# Altium footprint library FootPrintLib_12.PcbLib: 319 footprints (part 9 of 20)
Each footprint in its own frame and in the unit in brackets; x right, y up, seen from the top. Pads: shape width x height; smd on the part's side, far side on the other; paste and mask are expansions set on the pad; w line width, h text height; cw(c..) or ccw(c..) is an arc to the next point about the centre after c.
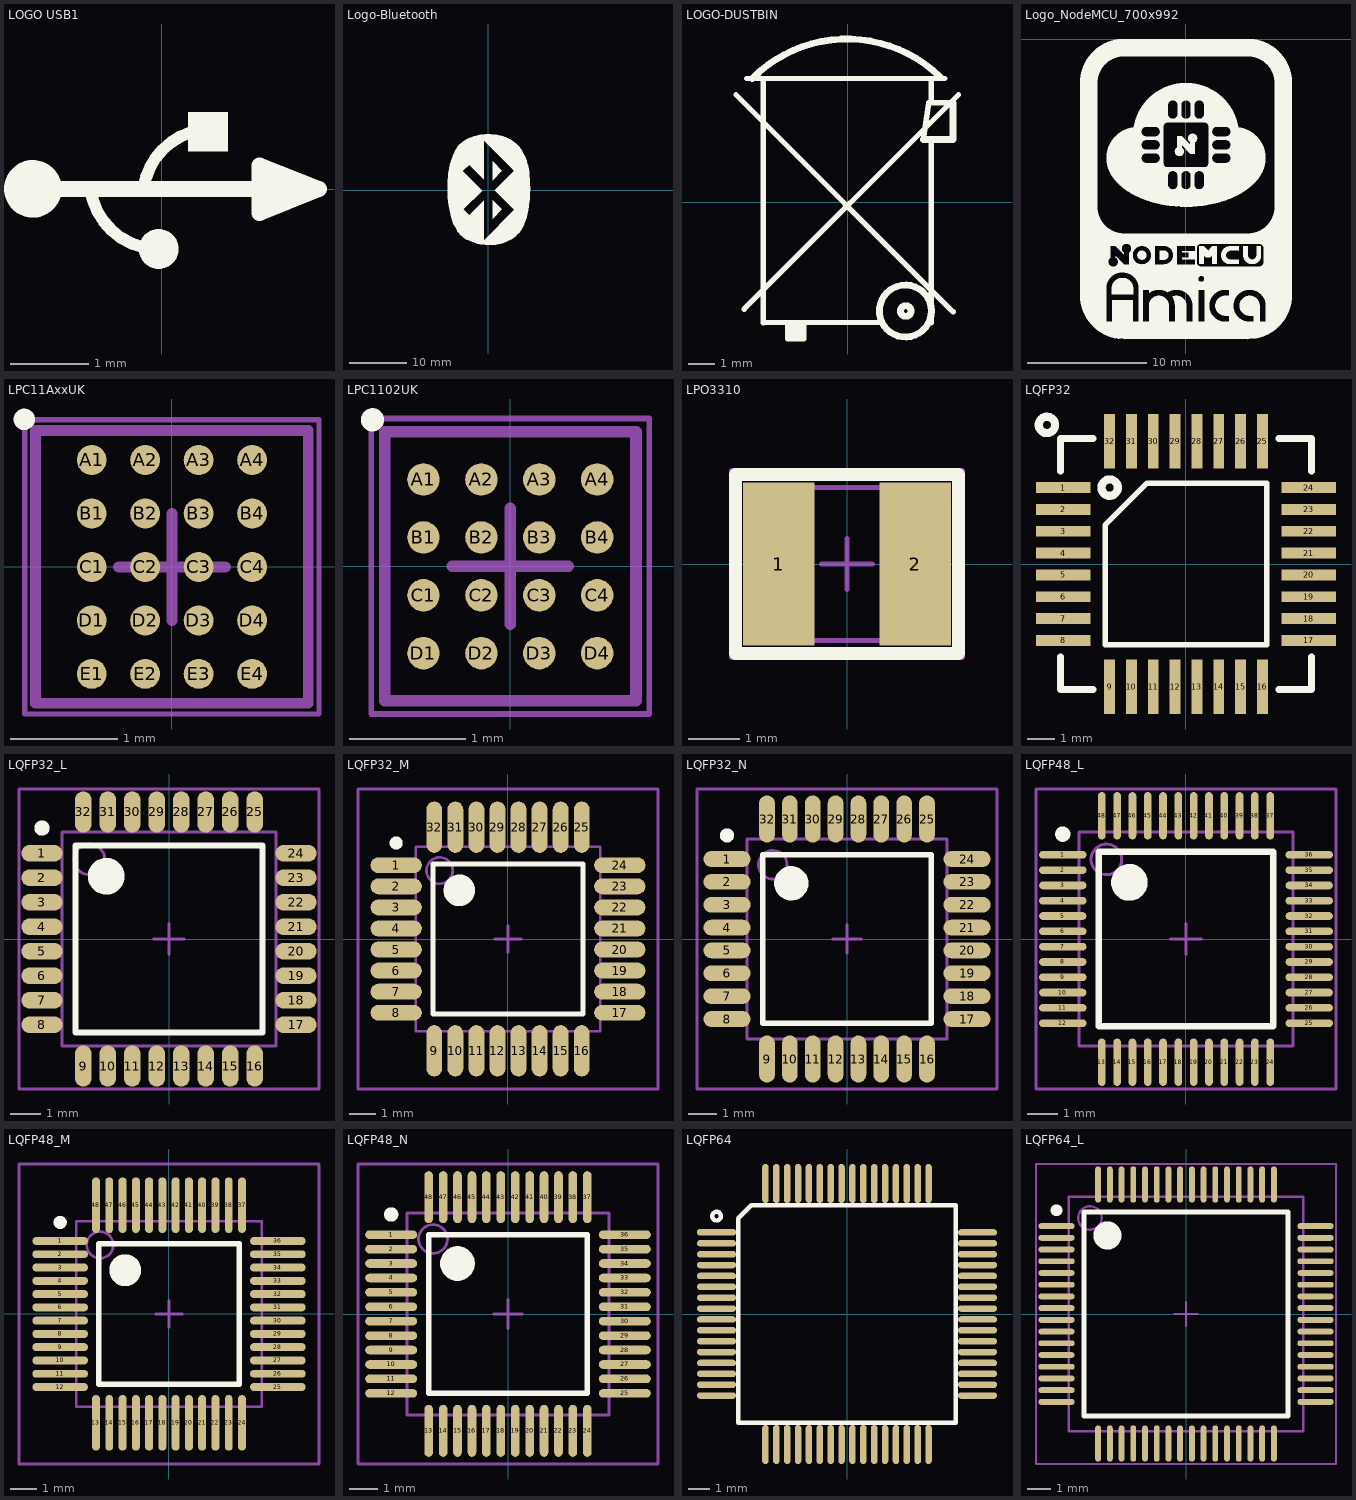
[diagram p8: the footprints below, top view; thin cyan lines are the x and y axes]

## LOGO USB1 [mm] "General USB Logo"
Top Overlay:
  circle w0.254: c-0.037,-0.767 r0.127
  circle w0.381: c-1.646,0.002 r0.178
  region: 0.335,0.987 0.335,0.477 0.845,0.477 0.845,0.987
  lines w0.152: -0.911,0 ccw(c-0.03,0.119) -0.082,-0.768 ; -0.234,0 cw(c0.647,-0.119) 0.377,0.727
  lines w0.203: -1.511,0 2.012,0 ; 1.248,0 2.012,0 ; 2.012,0 1.25,-0.31 1.25,0.3 2.012,0
  lines w0.381: 1.351,0 1.453,0

## Logo-Bluetooth [mm] "Logo-Bluetooth"
Top Overlay:
  region: -1.194,-9.22 -0.508,-9.322 0.762,-9.347 1.753,-9.246 3.048,-8.865 3.912,-8.458 4.674,-7.849 5.385,-7.061 6.02,-6.071 6.528,-4.597 6.883,-3.277 7.112,-1.549 7.163,0.33 7.087,1.803 7.01,3.073 6.807,4.191 6.553,5.232 6.147,6.172 5.588,7.137 5.029,7.772 4.42,8.306 3.277,8.992 2.388,9.296 1.6,9.474 0.508,9.601 -0.178,9.627 -0.889,9.55 -0.889,8.814 0.279,7.899 4.521,3.607 4.445,3.2 2.388,0.483 4.597,-3.404
  region: -0.406,9.627 -2.769,9.144 -4.42,8.204 -5.232,7.315 -5.994,6.096 -6.299,5.258 -6.629,4.089 -6.731,3.048 -6.909,1.727 -6.858,-1.321 -6.655,-2.819 -6.274,-4.801 -5.817,-6.045 -4.877,-7.468 -3.886,-8.255 -1.778,-9.22 -0.737,-9.322 -0.762,-8.484 -3.327,-4.343 -4.394,-3.251 -4.394,3.632 -2.997,4.699 -0.737,8.738 -0.406,9.601
  region: 4.648,3.251 -0.838,8.738 3.277,7.493
  region: -0.864,-8.788 4.623,-3.302 3.378,-7.417
  region: 1.118,0.051 4.496,3.429 4.572,-3.404
  region: -4.115,-5.182 -0.762,-1.829 -0.762,-8.534
  region: -4.115,5.283 -0.762,8.687 -0.762,1.93
  region: -3.2,4.521 -4.445,3.277 -4.445,4.521
  region: -4.343,-3.277 -3.2,-4.42 -4.343,-4.42
  region: -1.041,-0.025 -4.394,-3.378 -4.394,3.327
  region: 0.762,-1.676 0.762,-4.928 2.388,-3.302
  region: 0.762,5.029 0.762,1.778 2.388,3.404
  lines w0.254: -6.934,0.203 ccw(c11.215,0.203) -6.231,-4.801 ; -6.935,0.267 cw(c11.214,0.267) -6.231,5.27 ; -6.569,-0.24 cw(c2.959,1.968) -5.58,6.737 ; -6.248,5.182 cw(c-0.978,4.077) -0.939,9.462 ; -6.172,-4.851 ccw(c-0.902,-3.746) -0.862,-9.131 ; -5.805,-5.937 cw(c0.597,-2.756) -5.537,0.914 ; -5.461,-5.613 ccw(c-2.007,-5.385) -1.778,-8.839 ; -4.14,8.458 cw(c0,1.676) 3.281,8.913 ; -4.013,-8.204 ccw(c0.025,-1.549) 3.578,-8.476 ; 0.076,-9.296 ccw(c0.762,-3.505) 6.553,-4.191 ; 1.041,9.55 cw(c0.724,3.569) 6.706,3.251 ; 4.572,-4.801 ccw(c0.8,0.318) 5.918,4.089 ; 5.621,-6.726 ccw(c-0.889,-2.489) 6.477,-0.025 ; 5.976,6.41 cw(c-2.654,1.867) 7.061,2.718 ; 6.477,-4.75 ccw(c-1.778,-1.803) 6.672,0.527 ; 6.745,-3.718 ccw(c-7.68,-0.33) 7.137,-0.33 ; 6.745,4.226 cw(c-7.68,0.838) 7.137,0.838

## LOGO-DUSTBIN [mm] "LOGO-DUSTBIN"
Top Overlay:
  circle w0.254: c2.155,-4.064 r0.974
  circle w0.254: c2.166,-4.064 r0.2
  lines w0.2: -4.187,4.032 3.941,-4.096 ; -3.882,-3.994 4.144,4.032 ; -3.78,4.642 3.636,4.642 ; -3.171,4.642 -3.171,-4.502 1.27,-4.496 ; -2.256,-5.01 -1.647,-5.01 ; -2.256,-4.909 -1.647,-4.909 ; -2.256,-4.807 -1.647,-4.807 ; -2.256,-4.705 -1.647,-4.705 ; -2.256,-4.604 -1.647,-4.604 ; -2.256,-4.502 -2.256,-5.112 -1.647,-5.112 -1.647,-4.502 ; -2.155,-5.112 -2.155,-4.502 ; -2.053,-5.112 -2.053,-4.502 ; -1.952,-5.112 -1.952,-4.502 ; -1.85,-5.112 -1.85,-4.502 ; -1.748,-5.112 -1.748,-4.502 ; 2.819,2.362 3.027,3.727 3.941,3.727 ; 3.128,-4.502 3.128,2.305 ; 3.128,3.727 3.128,4.642
  lines w0.254: -3.581,4.642 cw(c-0.032,1.121) 3.46,4.7 ; 2.819,2.362 3.937,2.362 3.941,3.727

## Logo_NodeMCU_700x992 [mm] "Logo NodeMCU"
Top Overlay:
  drawing of 9 lines, arcs and shapes, not listed

## LPC11AxxUK [mm] "BGA, 16-Leads, Body 2.55x2.55mm, Pitch 0.5mm, NXP Recommended Pads"
height 0.65
pads (20):
  round 0.28 smd: A1(-0.75,1) A2(-0.25,1) A3(0.25,1) A4(0.75,1) B1(-0.75,0.5) B2(-0.25,0.5) B3(0.25,0.5) B4(0.75,0.5) C1(-0.75,0) C2(-0.25,0) C3(0.25,0) C4(0.75,0) D1(-0.75,-0.5) D2(-0.25,-0.5) D3(0.25,-0.5) D4(0.75,-0.5) E1(-0.75,-1) E2(-0.25,-1) E3(0.25,-1) E4(0.75,-1)
Top Overlay:
  circle w0.1: c-1.38,1.38 r0.05
Mechanical 13:
  lines w0.1: -1.275,-1.275 1.275,-1.275 1.275,1.275 -1.275,1.275 -1.275,-1.275
Mechanical 15:
  lines w0.05: -1.375,-1.375 -1.375,1.375 1.375,1.375 1.375,-1.375 -1.375,-1.375
  lines w0.1: -0.5,0 0.5,0 ; 0,-0.5 0,0.5
3D body: height 0.65, standoff 0.21, extent -1.275,-1.275 1.275,1.275

## LPC1102UK [mm] "BGA, 16-Leads, Body 2.32x2.17mm, Pitch 0.5mm, NXP Recommended Pads"
height 0.65
pads (16):
  round 0.28 smd: A1(-0.75,0.75) A2(-0.25,0.75) A3(0.25,0.75) A4(0.75,0.75) B1(-0.75,0.25) B2(-0.25,0.25) B3(0.25,0.25) B4(0.75,0.25) C1(-0.75,-0.25) C2(-0.25,-0.25) C3(0.25,-0.25) C4(0.75,-0.25) D1(-0.75,-0.75) D2(-0.25,-0.75) D3(0.25,-0.75) D4(0.75,-0.75)
Top Overlay:
  circle w0.1: c-1.19,1.265 r0.05
Mechanical 13:
  lines w0.1: -1.085,-1.16 1.085,-1.16 1.085,1.16 -1.085,1.16 -1.085,-1.16
Mechanical 15:
  lines w0.05: -1.2,-1.275 1.2,-1.275 1.2,1.275 -1.2,1.275 -1.2,-1.275
  lines w0.1: -0.5,0 0.5,0 ; 0,-0.5 0,0.5
3D body: height 0.65, standoff 0.21, extent -1.085,-1.16 1.085,1.16

## LPO3310 [mm] "LPO3310 SMT Power Inductor, 3.3x3.3x1mm"
height 1
pads (2):
  rect 1.4x3.2 smd: 1(-1.34,0) 2(1.34,0)
Top Overlay:
  lines w0.254: -2.184,-1.753 -2.184,1.753 2.184,1.753 2.184,-1.753 -2.184,-1.753
Mechanical 13:
  lines w0.1: -1.5,-1.5 -1.5,1.5 1.5,1.5 1.5,-1.5 -1.5,-1.5
Mechanical 15:
  lines w0.1: -0.5,0 0.5,0 ; 0,-0.5 0,0.5 ; -2.261,-1.829 -2.261,1.829 2.261,1.829 2.261,-1.829 -2.261,-1.829
3D body "Inductor SMD 3x3 semi-shielded.step": height 1, standoff 0, extent -1.501,-1.5 1.501,1.5

## LQFP32 [mm]
pads (32):
  rect 2x0.4 smd: 1(-4.5,2.8) 2(-4.5,2) 3(-4.5,1.2) 4(-4.5,0.4) 5(-4.5,-0.4) 6(-4.5,-1.2) 7(-4.5,-2) 8(-4.5,-2.8) 17(4.5,-2.8) 18(4.5,-2) 19(4.5,-1.2) 20(4.5,-0.4) 21(4.5,0.4) 22(4.5,1.2) 23(4.5,2) 24(4.5,2.8)
  rect 0.4x2 smd: 9(-2.8,-4.5) 10(-2,-4.5) 11(-1.2,-4.5) 12(-0.4,-4.5) 13(0.4,-4.5) 14(1.2,-4.5) 15(2,-4.5) 16(2.8,-4.5) 25(2.8,4.5) 26(2,4.5) 27(1.2,4.5) 28(0.4,4.5) 29(-0.4,4.5) 30(-1.2,4.5) 31(-2,4.5) 32(-2.8,4.5)
Top Overlay:
  circle w0.3: c-5.1,5.1 r0.3
  circle w0.3: c-2.8,2.8 r0.3
  lines w0.2: -2.965,-2.965 2.965,-2.965 2.965,2.965 -1.43,2.965 -2.965,1.43 -2.965,-2.965
  lines w0.25: -4.6,-3.4 -4.6,-4.6 -3.4,-4.6 ; -4.6,3.4 -4.6,4.6 -3.4,4.6 ; 3.4,-4.6 4.6,-4.6 4.6,-3.4 ; 3.4,4.6 4.6,4.6 4.6,3.4
3D body "User Library-LQFP32-2.STEP": height 1.62, standoff -0.01, extent -4.572,-4.572 4.572,4.572

## LQFP32_L [mm] "Thin QFP, 32-Leads, Body 7x7mm, Pitch 0.8mm, IPC High Density"
height 1.2
pads (32):
  oval 1.35x0.55 smd: 1(-4.15,2.8) 2(-4.15,2) 3(-4.15,1.2) 4(-4.15,0.4) 5(-4.15,-0.4) 6(-4.15,-1.2) 7(-4.15,-2) 8(-4.15,-2.8) 17(4.15,-2.8) 18(4.15,-2) 19(4.15,-1.2) 20(4.15,-0.4) 21(4.15,0.4) 22(4.15,1.2) 23(4.15,2) 24(4.15,2.8)
  oval 0.55x1.35 smd: 9(-2.8,-4.15) 10(-2,-4.15) 11(-1.2,-4.15) 12(-0.4,-4.15) 13(0.4,-4.15) 14(1.2,-4.15) 15(2,-4.15) 16(2.8,-4.15) 25(2.8,4.15) 26(2,4.15) 27(1.2,4.15) 28(0.4,4.15) 29(-0.4,4.15) 30(-1.2,4.15) 31(-2,4.15) 32(-2.8,4.15)
Top Overlay:
  circle w0.25: c-4.15,3.625 r0.125
  circle w0.6: c-2.05,2.05 r0.3
  lines w0.2: -3.05,-3.05 -3.05,3.05 3.05,3.05 3.05,-3.05 -3.05,-3.05
Mechanical 13:
  circle w0.1: c-2.6,2.6 r0.5
  lines w0.1: -3.5,-3.5 -3.5,3.5 3.5,3.5 3.5,-3.5 -3.5,-3.5
Mechanical 15:
  lines w0.1: -0.5,0 0.5,0 ; 0,-0.5 0,0.5 ; -4.9,-4.9 -4.9,4.9 4.9,4.9 4.9,-4.9 -4.9,-4.9
3D body "User Library-LQFP-32.STEP": height 1.63, standoff -0.09, extent -4.5,-4.521 4.5,4.479

## LQFP32_M [mm] "Thin QFP, 32-Leads, Body 7x7mm, Pitch 0.8mm, IPC Low Density"
height 1.2
pads (32):
  oval 1.95x0.6 smd: 1(-4.25,2.8) 2(-4.25,2) 3(-4.25,1.2) 4(-4.25,0.4) 5(-4.25,-0.4) 6(-4.25,-1.2) 7(-4.25,-2) 8(-4.25,-2.8) 17(4.25,-2.8) 18(4.25,-2) 19(4.25,-1.2) 20(4.25,-0.4) 21(4.25,0.4) 22(4.25,1.2) 23(4.25,2) 24(4.25,2.8)
  oval 0.6x1.95 smd: 9(-2.8,-4.25) 10(-2,-4.25) 11(-1.2,-4.25) 12(-0.4,-4.25) 13(0.4,-4.25) 14(1.2,-4.25) 15(2,-4.25) 16(2.8,-4.25) 25(2.8,4.25) 26(2,4.25) 27(1.2,4.25) 28(0.4,4.25) 29(-0.4,4.25) 30(-1.2,4.25) 31(-2,4.25) 32(-2.8,4.25)
Top Overlay:
  circle w0.25: c-4.25,3.65 r0.125
  circle w0.6: c-1.85,1.85 r0.3
  lines w0.2: -2.85,-2.85 -2.85,2.85 2.85,2.85 2.85,-2.85 -2.85,-2.85
Mechanical 13:
  circle w0.1: c-2.6,2.6 r0.5
  lines w0.1: -3.5,-3.5 -3.5,3.5 3.5,3.5 3.5,-3.5 -3.5,-3.5
Mechanical 15:
  lines w0.1: -0.5,0 0.5,0 ; 0,-0.5 0,0.5 ; -5.7,-5.7 -5.7,5.7 5.7,5.7 5.7,-5.7 -5.7,-5.7
3D body "User Library-LQFP-32.STEP": height 1.63, standoff -0.09, extent -4.5,-4.521 4.5,4.479

## LQFP32_N [mm] "Thin QFP, 32-Leads, Body 7x7mm, Pitch 0.8mm, IPC Medium Density"
height 1.2
pads (32):
  oval 1.65x0.55 smd: 1(-4.2,2.8) 2(-4.2,2) 3(-4.2,1.2) 4(-4.2,0.4) 5(-4.2,-0.4) 6(-4.2,-1.2) 7(-4.2,-2) 8(-4.2,-2.8) 17(4.2,-2.8) 18(4.2,-2) 19(4.2,-1.2) 20(4.2,-0.4) 21(4.2,0.4) 22(4.2,1.2) 23(4.2,2) 24(4.2,2.8)
  oval 0.55x1.65 smd: 9(-2.8,-4.2) 10(-2,-4.2) 11(-1.2,-4.2) 12(-0.4,-4.2) 13(0.4,-4.2) 14(1.2,-4.2) 15(2,-4.2) 16(2.8,-4.2) 25(2.8,4.2) 26(2,4.2) 27(1.2,4.2) 28(0.4,4.2) 29(-0.4,4.2) 30(-1.2,4.2) 31(-2,4.2) 32(-2.8,4.2)
Top Overlay:
  circle w0.6: c-1.95,1.95 r0.3
  circle w0.25: c-4.2,3.625 r0.125
  lines w0.2: -2.95,-2.95 2.95,-2.95 2.95,2.95 -2.95,2.95 -2.95,-2.95
Mechanical 13:
  circle w0.1: c-2.6,2.6 r0.5
  lines w0.1: -3.5,-3.5 3.5,-3.5 3.5,3.5 -3.5,3.5 -3.5,-3.5
Mechanical 15:
  lines w0.1: -0.5,0 0.5,0 ; 0,-0.5 0,0.5 ; -5.25,-5.25 5.25,-5.25 5.25,5.25 -5.25,5.25 -5.25,-5.25
3D body "User Library-LQFP-32.STEP": height 1.63, standoff -0.09, extent -4.5,-4.521 4.5,4.479

## LQFP48_L [mm] "Thin QFP, 48-Leads, Body 7x7mm, Pitch 0.5mm, IPC High Density"
height 1.6
pads (48):
  oval 1.55x0.25 smd: 1(-4.025,2.75) 2(-4.025,2.25) 3(-4.025,1.75) 4(-4.025,1.25) 5(-4.025,0.75) 6(-4.025,0.25) 7(-4.025,-0.25) 8(-4.025,-0.75) 9(-4.025,-1.25) 10(-4.025,-1.75) 11(-4.025,-2.25) 12(-4.025,-2.75) 25(4.025,-2.75) 26(4.025,-2.25) 27(4.025,-1.75) 28(4.025,-1.25) 29(4.025,-0.75) 30(4.025,-0.25) 31(4.025,0.25) 32(4.025,0.75) 33(4.025,1.25) 34(4.025,1.75) 35(4.025,2.25) 36(4.025,2.75)
  oval 0.25x1.55 smd: 13(-2.75,-4.025) 14(-2.25,-4.025) 15(-1.75,-4.025) 16(-1.25,-4.025) 17(-0.75,-4.025) 18(-0.25,-4.025) 19(0.25,-4.025) 20(0.75,-4.025) 21(1.25,-4.025) 22(1.75,-4.025) 23(2.25,-4.025) 24(2.75,-4.025) 37(2.75,4.025) 38(2.25,4.025) 39(1.75,4.025) 40(1.25,4.025) 41(0.75,4.025) 42(0.25,4.025) 43(-0.25,4.025) 44(-0.75,4.025) 45(-1.25,4.025) 46(-1.75,4.025) 47(-2.25,4.025) 48(-2.75,4.025)
Top Overlay:
  circle w0.6: c-1.85,1.85 r0.3
  circle w0.25: c-4.025,3.425 r0.125
  lines w0.2: -2.85,-2.85 2.85,-2.85 2.85,2.85 -2.85,2.85 -2.85,-2.85
Mechanical 13:
  circle w0.1: c-2.6,2.6 r0.5
  lines w0.1: -3.5,-3.5 3.5,-3.5 3.5,3.5 -3.5,3.5 -3.5,-3.5
Mechanical 15:
  lines w0.1: -0.5,0 0.5,0 ; 0,-0.5 0,0.5 ; -4.9,-4.9 4.9,-4.9 4.9,4.9 -4.9,4.9 -4.9,-4.9
3D body "User Library-QFP-48.step": height 1.35, standoff 0, extent -4.514,-4.514 4.514,4.514

## LQFP48_M [mm] "Thin QFP, 48-Leads, Body 7x7mm, Pitch 0.5mm, IPC Low Density"
height 1.6
pads (48):
  oval 2.1x0.3 smd: 1(-4.1,2.75) 2(-4.1,2.25) 3(-4.1,1.75) 4(-4.1,1.25) 5(-4.1,0.75) 6(-4.1,0.25) 7(-4.1,-0.25) 8(-4.1,-0.75) 9(-4.1,-1.25) 10(-4.1,-1.75) 11(-4.1,-2.25) 12(-4.1,-2.75) 25(4.1,-2.75) 26(4.1,-2.25) 27(4.1,-1.75) 28(4.1,-1.25) 29(4.1,-0.75) 30(4.1,-0.25) 31(4.1,0.25) 32(4.1,0.75) 33(4.1,1.25) 34(4.1,1.75) 35(4.1,2.25) 36(4.1,2.75)
  oval 0.3x2.1 smd: 13(-2.75,-4.1) 14(-2.25,-4.1) 15(-1.75,-4.1) 16(-1.25,-4.1) 17(-0.75,-4.1) 18(-0.25,-4.1) 19(0.25,-4.1) 20(0.75,-4.1) 21(1.25,-4.1) 22(1.75,-4.1) 23(2.25,-4.1) 24(2.75,-4.1) 37(2.75,4.1) 38(2.25,4.1) 39(1.75,4.1) 40(1.25,4.1) 41(0.75,4.1) 42(0.25,4.1) 43(-0.25,4.1) 44(-0.75,4.1) 45(-1.25,4.1) 46(-1.75,4.1) 47(-2.25,4.1) 48(-2.75,4.1)
Top Overlay:
  circle w0.6: c-1.65,1.65 r0.3
  circle w0.25: c-4.1,3.45 r0.125
  lines w0.2: -2.65,-2.65 2.65,-2.65 2.65,2.65 -2.65,2.65 -2.65,-2.65
Mechanical 13:
  circle w0.1: c-2.6,2.6 r0.5
  lines w0.1: -3.5,-3.5 3.5,-3.5 3.5,3.5 -3.5,3.5 -3.5,-3.5
Mechanical 15:
  lines w0.1: -0.5,0 0.5,0 ; 0,-0.5 0,0.5 ; -5.65,-5.65 5.65,-5.65 5.65,5.65 -5.65,5.65 -5.65,-5.65
3D body "User Library-QFP-48.step": height 1.35, standoff 0, extent -4.514,-4.514 4.514,4.514

## LQFP48_N [mm] "Thin QFP, 48-Leads, Body 7x7mm, Pitch 0.5mm, IPC Medium Density"
height 1.6
pads (48):
  oval 1.8x0.3 smd: 1(-4.05,2.75) 2(-4.05,2.25) 3(-4.05,1.75) 4(-4.05,1.25) 5(-4.05,0.75) 6(-4.05,0.25) 7(-4.05,-0.25) 8(-4.05,-0.75) 9(-4.05,-1.25) 10(-4.05,-1.75) 11(-4.05,-2.25) 12(-4.05,-2.75) 25(4.05,-2.75) 26(4.05,-2.25) 27(4.05,-1.75) 28(4.05,-1.25) 29(4.05,-0.75) 30(4.05,-0.25) 31(4.05,0.25) 32(4.05,0.75) 33(4.05,1.25) 34(4.05,1.75) 35(4.05,2.25) 36(4.05,2.75)
  oval 0.3x1.8 smd: 13(-2.75,-4.05) 14(-2.25,-4.05) 15(-1.75,-4.05) 16(-1.25,-4.05) 17(-0.75,-4.05) 18(-0.25,-4.05) 19(0.25,-4.05) 20(0.75,-4.05) 21(1.25,-4.05) 22(1.75,-4.05) 23(2.25,-4.05) 24(2.75,-4.05) 37(2.75,4.05) 38(2.25,4.05) 39(1.75,4.05) 40(1.25,4.05) 41(0.75,4.05) 42(0.25,4.05) 43(-0.25,4.05) 44(-0.75,4.05) 45(-1.25,4.05) 46(-1.75,4.05) 47(-2.25,4.05) 48(-2.75,4.05)
Top Overlay:
  circle w0.25: c-4.05,3.45 r0.125
  circle w0.6: c-1.75,1.75 r0.3
  lines w0.2: -2.75,-2.75 -2.75,2.75 2.75,2.75 2.75,-2.75 -2.75,-2.75
Mechanical 13:
  circle w0.1: c-2.6,2.6 r0.5
  lines w0.1: -3.5,-3.5 -3.5,3.5 3.5,3.5 3.5,-3.5 -3.5,-3.5
Mechanical 15:
  lines w0.1: -0.5,0 0.5,0 ; 0,-0.5 0,0.5 ; -5.2,-5.2 -5.2,5.2 5.2,5.2 5.2,-5.2 -5.2,-5.2
3D body "User Library-QFP-48.step": height 1.35, standoff 0, extent -4.514,-4.514 4.514,4.514

## LQFP64 [mm]
pads (64):
  oct 1.8x0.3 smd: 1(-6,3.75)
  oval 1.8x0.3 smd: 2(-6,3.25) 3(-6,2.75) 4(-6,2.25) 5(-6,1.75) 6(-6,1.25) 7(-6,0.75) 8(-6,0.25) 9(-6,-0.25) 10(-6,-0.75) 11(-6,-1.25) 12(-6,-1.75) 13(-6,-2.25) 14(-6,-2.75) 15(-6,-3.25) 16(-6,-3.75) 33(6,-3.75) 34(6,-3.25) 35(6,-2.75) 36(6,-2.25) 37(6,-1.75) 38(6,-1.25) 39(6,-0.75) 40(6,-0.25) 41(6,0.25) 42(6,0.75) 43(6,1.25) 44(6,1.75) 45(6,2.25) 46(6,2.75) 47(6,3.25) 48(6,3.75)
  oval 0.3x1.8 smd: 17(-3.75,-6) 18(-3.25,-6) 19(-2.75,-6) 20(-2.25,-6) 21(-1.75,-6) 22(-1.25,-6) 23(-0.75,-6) 24(-0.25,-6) 25(0.25,-6) 26(0.75,-6) 27(1.25,-6) 28(1.75,-6) 29(2.25,-6) 30(2.75,-6) 31(3.25,-6) 32(3.75,-6) 49(3.75,6) 50(3.25,6) 51(2.75,6) 52(2.25,6) 53(1.75,6) 54(1.25,6) 55(0.75,6) 56(0.25,6) 57(-0.25,6) 58(-0.75,6) 59(-1.25,6) 60(-1.75,6) 61(-2.25,6) 62(-2.75,6) 63(-3.25,6) 64(-3.75,6)
Top Overlay:
  circle w0.2: c-6,4.5 r0.2
  lines w0.2: -5,-5 5,-5 5,5 -4.4,5 -5,4.4 -5,-5

## LQFP64_L [mm] "Thin QFP, 64-Leads, Body 10x10mm, Pitch 0.5mm, IPC High Density"
height 1.6
pads (64):
  oval 1.55x0.25 smd: 1(-5.525,3.75) 2(-5.525,3.25) 3(-5.525,2.75) 4(-5.525,2.25) 5(-5.525,1.75) 6(-5.525,1.25) 7(-5.525,0.75) 8(-5.525,0.25) 9(-5.525,-0.25) 10(-5.525,-0.75) 11(-5.525,-1.25) 12(-5.525,-1.75) 13(-5.525,-2.25) 14(-5.525,-2.75) 15(-5.525,-3.25) 16(-5.525,-3.75) 33(5.525,-3.75) 34(5.525,-3.25) 35(5.525,-2.75) 36(5.525,-2.25) 37(5.525,-1.75) 38(5.525,-1.25) 39(5.525,-0.75) 40(5.525,-0.25) 41(5.525,0.25) 42(5.525,0.75) 43(5.525,1.25) 44(5.525,1.75) 45(5.525,2.25) 46(5.525,2.75) 47(5.525,3.25) 48(5.525,3.75)
  oval 0.25x1.55 smd: 17(-3.75,-5.525) 18(-3.25,-5.525) 19(-2.75,-5.525) 20(-2.25,-5.525) 21(-1.75,-5.525) 22(-1.25,-5.525) 23(-0.75,-5.525) 24(-0.25,-5.525) 25(0.25,-5.525) 26(0.75,-5.525) 27(1.25,-5.525) 28(1.75,-5.525) 29(2.25,-5.525) 30(2.75,-5.525) 31(3.25,-5.525) 32(3.75,-5.525) 49(3.75,5.525) 50(3.25,5.525) 51(2.75,5.525) 52(2.25,5.525) 53(1.75,5.525) 54(1.25,5.525) 55(0.75,5.525) 56(0.25,5.525) 57(-0.25,5.525) 58(-0.75,5.525) 59(-1.25,5.525) 60(-1.75,5.525) 61(-2.25,5.525) 62(-2.75,5.525) 63(-3.25,5.525) 64(-3.75,5.525)
Top Overlay:
  circle w0.6: c-3.35,3.35 r0.3
  circle w0.25: c-5.525,4.425 r0.125
  lines w0.2: -4.35,-4.35 4.35,-4.35 4.35,4.35 -4.35,4.35 -4.35,-4.35
Mechanical 13:
  circle w0.1: c-4.1,4.1 r0.5
  lines w0.1: -5,-5 5,-5 5,5 -5,5 -5,-5
Mechanical 15:
  lines w0.1: -0.5,0 0.5,0 ; 0,-0.5 0,0.5 ; -6.4,-6.4 6.4,-6.4 6.4,6.4 -6.4,6.4 -6.4,-6.4
3D body "User Library-QFP-64.step": height 1.35, standoff 0, extent -6.014,-6.034 6.014,5.994